# Altium schematic symbol library Tony_.SchLib: 178 symbols (part 3 of 6)
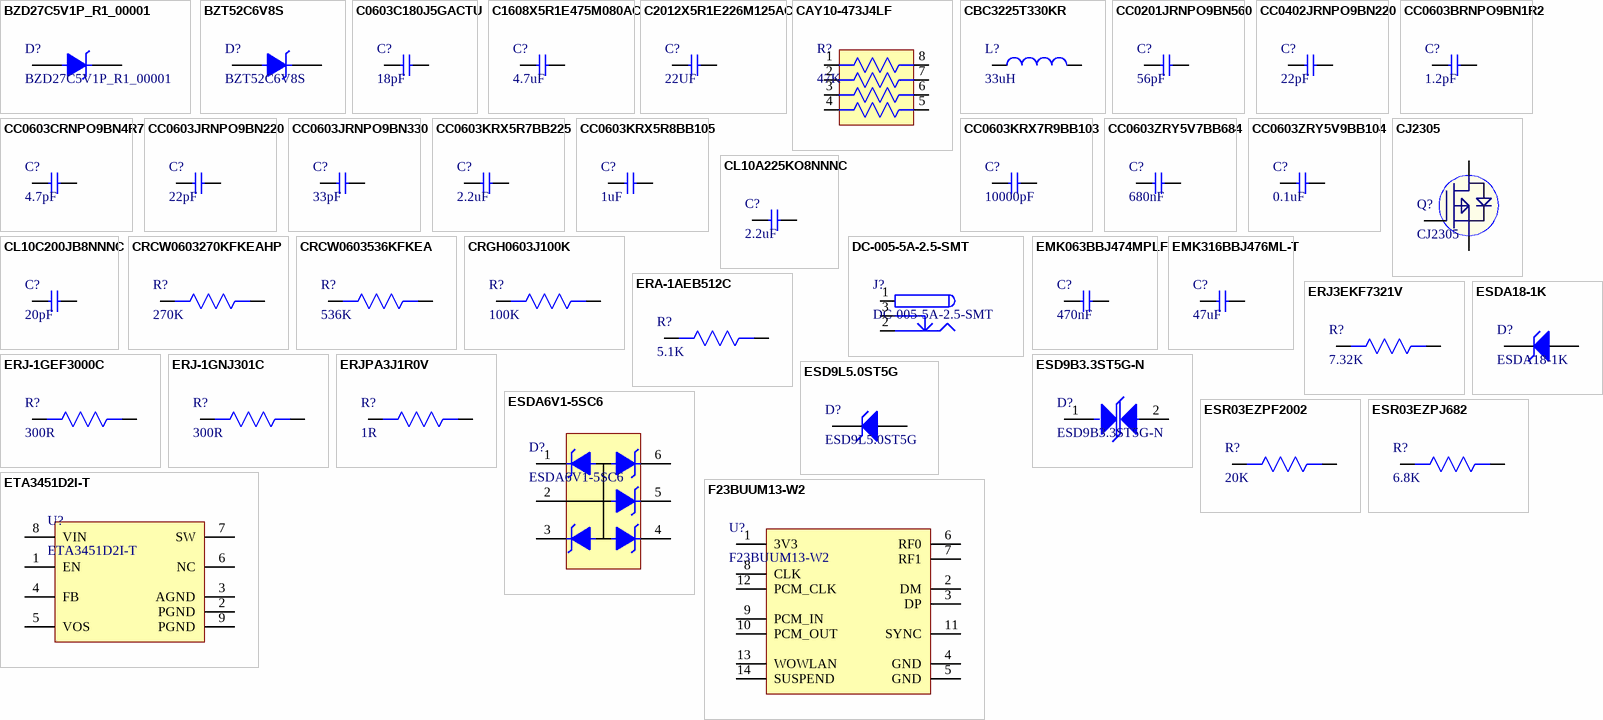
[diagram p6: symbols BZD27C5V1P_R1_00001 to F23BUUM13-W2]

## CC0603JRNPO9BN330
designator C?, comment 33pF
CAP CER 33PF 50V C0G/NPO 0603; Manufacturer: Yageo; Manufacturer Part Number: CC0603JRNPO9BN330; Dielectric Material: Ceramic; Tolerance: 5%; Dielectric: C0G; Temperature Coefficient: 30ppm/°C; Insulation Resistance: 100GR; Supplier 1: Digi-Key; Stock 1: 490595; Pricing 1: 1=0.1, 10=0.045, 100=0.0199, 500=0.01424, 1000=0.01119 (USD); Mount: Surface Mount; Case/Package: 0603; Number of Pins: 2; Case Code (Metric): 1608; Case Code (Imperial): 0603; Min Operating Temperature: -55°C; Max Operating Temperature: 125°C; Capacitance: 33pF; Packaging: Tape and Reel; Voltage Rating: 50V; Package Quantity: 1; Voltage Rating (DC): 50V; Termination: SMD/SMT; Composition: Ceramic; Voltage: 50V; Length: 1.6mm; Height: 0.8mm; Width: 0.031inch; Thickness: 0.035inch; Depth: 0.8mm; Radiation Hardening: No; REACH SVHC: No SVHC; Lead Free: Lead Free; ComponentLink1URL: http://www.yageo.com/documents/recent/UPY-GP_NP0_16V-to-50V_16.pdf?src-supplier=Digi-Key; ComponentLink1Description: http://www.yageo.com/documents/recent/UPY-GP_NP0_16V-to-50V_16.pdf?src-supplier=Digi-Key; ComponentLink2URL: http://www.mouser.com/ds/2/447/Yageo_UPY-GP_NP0_16V-to-50V_9-358835.pdf?src-supplier=Mouser; ComponentLink2Description: http://www.mouser.com/ds/2/447/Yageo_UPY-GP_NP0_16V-to-50V_9-358835.pdf?src-supplier=Mouser; ComponentLink3URL: http://www.farnell.com/datasheets/2213336.pdf?src-supplier=Element14; ComponentLink3Description: http://www.farnell.com/datasheets/2213336.pdf?src-supplier=Element14; ComponentLink4URL: http://www.farnell.com/datasheets/1443161.pdf?src-supplier=Element14; ComponentLink4Description: http://www.farnell.com/datasheets/1443161.pdf?src-supplier=Element14; ComponentLink5URL: http://www.yageo.com/documents/recent/UPY-GP_NP0_16V-to-50V_8.pdf?src-supplier=Avnet; ComponentLink5Description: http://www.yageo.com/documents/recent/UPY-GP_NP0_16V-to-50V_8.pdf?src-supplier=Avnet; ComponentLink6URL: https://www.verical.com/server-webapp/html/getDatasheet?partID=403532&src-supplier=Verical; ComponentLink6Description: https://www.verical.com/server-webapp/html/getDatasheet?partID=403532&src-supplier=Verical; Supplier Part Number 1: 311-1064-1-ND
footprint Cap0603
pins: 1, 2

## CC0603KRX5R7BB225
designator C?, comment 2.2uF
CAP CER 2.2UF 16V X5R 0603; Manufacturer: Yageo; Manufacturer Part Number: CC0603KRX5R7BB225; Tolerance: 10%; Supplier 1: Digi-Key; Stock 1: 261060; Pricing 1: 1=0.2, 10=0.137, 100=0.0694, 500=0.0475, 1000=0.04202 (USD); Mount: Surface Mount; Case/Package: 0603; Case Code (Imperial): 0603; Case Code (Metric): 1608; Min Operating Temperature: -55°C; Max Operating Temperature: 85°C; Capacitance: 2.2uF; Dielectric: X5R; Voltage Rating: 16V; Packaging: Tape and Reel; Voltage Rating (DC): 16V; Termination: SMD/SMT; Composition: Ceramic; Length: 1.6mm; Height: 0.8mm; Width: 0.031inch; Thickness: 0.035inch; Depth: 0.8mm; Radiation Hardening: No; REACH SVHC: Unknown; Lead Free: Lead Free; Halogen Free: Halogen Free; ComponentLink1URL: http://www.farnell.com/datasheets/2167237.pdf?src-supplier=Element14; ComponentLink1Description: http://www.farnell.com/datasheets/2167237.pdf?src-supplier=Element14; Supplier Part Number 1: 311-1784-6-ND
footprint Cap0603
pins: 1, 2

## CC0603KRX5R8BB105
designator C?, comment 1uF
CAP CER 1UF 25V X5R 0603; Manufacturer: Yageo; Manufacturer Part Number: CC0603KRX5R8BB105; Tolerance: 10%; Supplier 1: Digi-Key; Stock 1: 459947; Pricing 1: 1=0.1, 10=0.076, 100=0.0337, 500=0.0241, 1000=0.01894 (USD); Mount: Surface Mount; Case/Package: 0603; Number of Pins: 2; Case Code (Metric): 1608; Case Code (Imperial): 0603; Min Operating Temperature: -55°C; Max Operating Temperature: 85°C; Capacitance: 1uF; Dielectric: X5R; Package Quantity: 1; Voltage Rating: 25V; Packaging: Tape and Reel; Termination: SMD/SMT; Voltage Rating (DC): 25V; Length: 1.6mm; Height: 0.8mm; Width: 0.031inch; Thickness: 0.035inch; Depth: 0.8mm; Radiation Hardening: No; REACH SVHC: No SVHC; Lead Free: Lead Free; Halogen Free: Halogen Free; ComponentLink1URL: http://www.yageo.com/documents/recent/UPY-GPHC_X5R_4V-to-50V_25.pdf?src-supplier=Digi-Key; ComponentLink1Description: http://www.yageo.com/documents/recent/UPY-GPHC_X5R_4V-to-50V_25.pdf?src-supplier=Digi-Key; ComponentLink2URL: http://www.yageo.com/documents/recent/UPY-GPHC_X5R_4V-to-50V_12.pdf?src-supplier=Avnet+Europe; ComponentLink2Description: http://www.yageo.com/documents/recent/UPY-GPHC_X5R_4V-to-50V_12.pdf?src-supplier=Avnet+Europe; ComponentLink3URL: http://www.farnell.com/datasheets/1525783.pdf?src-supplier=Element14; ComponentLink3Description: http://www.farnell.com/datasheets/1525783.pdf?src-supplier=Element14; ComponentLink4URL: http://www.yageo.com/documents/recent/UPY-GPHC_X5R_4V-to-50V_12.pdf?src-supplier=Avnet; ComponentLink4Description: http://www.yageo.com/documents/recent/UPY-GPHC_X5R_4V-to-50V_12.pdf?src-supplier=Avnet; Supplier Part Number 1: 311-1445-1-ND
footprint Cap0603
pins: 1, 2

## CC0603KRX7R9BB103
designator C?, comment 10000pF
CAP CER 10000PF 50V X7R 0603; Manufacturer: Yageo; Manufacturer Part Number: CC0603KRX7R9BB103; Material: Ceramic; Tolerance: 10%; Capacitance: 10nF; Insulation Resistance: 100GR; Supplier 1: Digi-Key; Stock 1: 8411467; Pricing 1: 1=0.1, 10=0.038, 100=0.0171, 500=0.01224, 1000=0.00962 (USD); Mount: Surface Mount; Case/Package: 0603; Number of Pins: 2; Case Code (Metric): 1608; Case Code (Imperial): 0603; Min Operating Temperature: -55°C; Max Operating Temperature: 125°C; Dielectric: X7R; Voltage: 50V; Packaging: Tape and Reel; Voltage Rating: 50V; Voltage Rating (DC): 50V; Package Quantity: 1; Termination: SMD/SMT; Composition: Ceramic; Length: 1.6mm; Height: 0.8mm; Width: 0.031inch; Thickness: 0.035inch; Depth: 0.8mm; Radiation Hardening: No; REACH SVHC: No SVHC; Lead Free: Lead Free; Halogen Free: Halogen Free; ComponentLink1URL: http://www.farnell.com/datasheets/1734573.pdf?src-supplier=Element14; ComponentLink1Description: http://www.farnell.com/datasheets/1734573.pdf?src-supplier=Element14; ComponentLink2URL: http://www.yageo.com/documents/recent/UPY-GPHC_X7R_6.3V-to-50V_18.pdf?src-supplier=Digi-Key; ComponentLink2Description: http://www.yageo.com/documents/recent/UPY-GPHC_X7R_6.3V-to-50V_18.pdf?src-supplier=Digi-Key; ComponentLink3URL: http://www.farnell.com/datasheets/2167236.pdf?src-supplier=Mouser; ComponentLink3Description: http://www.farnell.com/datasheets/2167236.pdf?src-supplier=Mouser; ComponentLink4URL: http://www.farnell.com/datasheets/70765.pdf?src-supplier=Element14; ComponentLink4Description: http://www.farnell.com/datasheets/70765.pdf?src-supplier=Element14; ComponentLink5URL: http://www.yageo.com/documents/recent/UPY-GPHC_X7R_6.3V-to-50V_8.pdf?src-supplier=Avnet+Europe; ComponentLink5Description: http://www.yageo.com/documents/recent/UPY-GPHC_X7R_6.3V-to-50V_8.pdf?src-supplier=Avnet+Europe; ComponentLink6URL: http://www.farnell.com/datasheets/1489800.pdf?src-supplier=Element14; ComponentLink6Description: http://www.farnell.com/datasheets/1489800.pdf?src-supplier=Element14; ComponentLink7URL: https://www.verical.com/server-webapp/html/getDatasheet?partID=403582&src-supplier=Verical; ComponentLink7Description: https://www.verical.com/server-webapp/html/getDatasheet?partID=403582&src-supplier=Verical; Supplier Part Number 1: 311-1085-6-ND
footprint Cap0603
pins: 1, 2

## CC0603ZRY5V7BB684
designator C?, comment 680nF
CAP CER 0.68UF 16V Y5V 0603; Manufacturer: Yageo; Manufacturer Part Number: CC0603ZRY5V7BB684; Tolerance: 80%; Supplier 1: Digi-Key; RoHS: Yes; Category: Ceramic Capacitors; Stock 1: 604; Pricing 1: 1=0.12000, 10=0.08200, 50=0.04660, 100=0.03860, 500=0.02704, 1000=0.02239 (USD); Mount: Surface Mount; Case/Package: 0603; Case Code (Metric): 1608; Case Code (Imperial): 0603; Min Operating Temperature: -30°C; Max Operating Temperature: 85°C; Voltage Rating: 16V; Voltage Rating (DC): 16V; Capacitance: 680nF; Packaging: Tape and Reel; Length: 0.063inch; Width: 0.031inch; Thickness: 0.035inch; Lead Free: Lead Free; Halogen Free: Halogen Free; ComponentLink1URL: http://www.mouser.com/ds/2/447/Yageo_UPY-GP_NP0_16V-to-50V_9-358835.pdf?src-supplier=Mouser; ComponentLink1Description: http://www.mouser.com/ds/2/447/Yageo_UPY-GP_NP0_16V-to-50V_9-358835.pdf?src-supplier=Mouser; ComponentLink2URL: http://www.yageo.com/documents/recent/UPY-GPHC_Y5V_6.3V-to-50V_8.pdf?src-supplier=Digi-Key; ComponentLink2Description: http://www.yageo.com/documents/recent/UPY-GPHC_Y5V_6.3V-to-50V_8.pdf?src-supplier=Digi-Key; Supplier Part Number 1: 311-1828-1-ND
footprint Cap0603
pins: 1, 2

## CC0603ZRY5V9BB104
designator C?, comment 0.1uF
CAP CER 0.1UF 50V Y5V 0603; Manufacturer: Yageo; Manufacturer Part Number: CC0603ZRY5V9BB104; Capacitance: 100nF; Tolerance: 80%; Supplier 1: Digi-Key; Stock 1: 15000880; Pricing 1: 1=0.1, 10=0.075, 100=0.0334, 500=0.02386, 1000=0.01874 (USD); Mount: Surface Mount; Case/Package: 0603; Number of Pins: 2; Case Code (Metric): 1608; Case Code (Imperial): 0603; Min Operating Temperature: -30°C; Max Operating Temperature: 85°C; Dielectric: Y5V; Voltage Rating: 50V; Package Quantity: 1; Packaging: Tape and Reel; Voltage Rating (DC): 50V; Termination: SMD/SMT; Composition: Ceramic; Voltage: 50V; Length: 1.6mm; Height: 0.8mm; Width: 0.031inch; Thickness: 0.035inch; Depth: 0.8mm; Radiation Hardening: No; REACH SVHC: No SVHC; Lead Free: Lead Free; Halogen Free: Halogen Free; ComponentLink1URL: http://www.yageo.com/documents/recent/UPY-GPHC_Y5V_6.3V-to-50V_8.pdf?src-supplier=Digi-Key; ComponentLink1Description: http://www.yageo.com/documents/recent/UPY-GPHC_Y5V_6.3V-to-50V_8.pdf?src-supplier=Digi-Key; ComponentLink2URL: http://www.yageo.com/documents/recent/UPY-GPHC_Y5V_6.3V-to-50V_5.pdf?src-supplier=Avnet+Europe; ComponentLink2Description: http://www.yageo.com/documents/recent/UPY-GPHC_Y5V_6.3V-to-50V_5.pdf?src-supplier=Avnet+Europe; ComponentLink3URL: https://www.verical.com/server-webapp/html/getDatasheet?partID=403611&src-supplier=Verical; ComponentLink3Description: https://www.verical.com/server-webapp/html/getDatasheet?partID=403611&src-supplier=Verical; ComponentLink4URL: http://www.mouser.com/ds/2/447/Yageo_UPY-GP_NP0_16V-to-50V_9-358835.pdf?src-supplier=Mouser; ComponentLink4Description: http://www.mouser.com/ds/2/447/Yageo_UPY-GP_NP0_16V-to-50V_9-358835.pdf?src-supplier=Mouser; ComponentLink5URL: http://www.farnell.com/datasheets/1132289.pdf?src-supplier=Element14; ComponentLink5Description: http://www.farnell.com/datasheets/1132289.pdf?src-supplier=Element14; Supplier Part Number 1: 311-1343-1-ND
footprint Cap0603
pins: 1, 2

## CJ2305
designator Q?
P-Channel -12V 4.1A 900mV @ 250uA 45mΩ @ 3.5A,4.5V 350mW SOT-23(SOT-23-3) MOSFET RoHS; Manufacturer: Changjiang Electronics Tech (CJ); Value: Custom; Manufacturer Part No: CJ2305; Package: SOT-23
footprint SOT-23 (TRANS NPN 40V 0.6A SOT23)
pins: 1 G, 2 S, 3 D

## CL10A225KO8NNNC
designator C?, comment 2.2uF
CAP CER 2.2UF 16V X5R 0603; Manufacturer: Samsung; Manufacturer Part Number: CL10A225KO8NNNC; Material: Ceramic; Tolerance: 10%; Supplier 1: Digi-Key; Stock 1: 421786; Pricing 1: 1=0.13, 10=0.092, 100=0.0435, 500=0.03048, 1000=0.02524 (USD); Mount: Surface Mount; Case/Package: 0603; Case Code (Metric): 1608; Case Code (Imperial): 0603; Contact Plating: Tin; Min Operating Temperature: -55°C; Max Operating Temperature: 85°C; Capacitance: 2.2uF; Dielectric: X5R; Packaging: Tape and Reel; Package Quantity: 4000; Voltage Rating: 16V; Voltage: 16V; Voltage Rating (DC): 16V; Length: 1.6mm; Height: 0.8mm; Width: 0.031inch; Thickness: 0.035inch; Depth: 0.8mm; Radiation Hardening: No; Lead Free: Lead Free; ComponentLink1URL: https://www.verical.com/server-webapp/html/getDatasheet?partID=355165&src-supplier=Verical; ComponentLink1Description: https://www.verical.com/server-webapp/html/getDatasheet?partID=355165&src-supplier=Verical; ComponentLink2URL: http://www.samsungsem.com/kr/support/product-search/mlcc/__icsFiles/afieldfile/2016/08/18/S_CL10A225KO8NNNC.pdf?src-supplier=Digi-Key; ComponentLink2Description: http://www.samsungsem.com/kr/support/product-search/mlcc/__icsFiles/afieldfile/2016/08/18/S_CL10A225KO8NNNC.pdf?src-supplier=Digi-Key; ComponentLink3URL: http://www1.futureelectronics.com/doc/SAMSUNG%20PASSIVE/CL05B104KQ5NNNC.pdf?src-supplier=Future+Electronics; ComponentLink3Description: http://www1.futureelectronics.com/doc/SAMSUNG%20PASSIVE/CL05B104KQ5NNNC.pdf?src-supplier=Future+Electronics; ComponentLink4URL: https://produktinfo.conrad.com/datenblaetter/450000-474999/457919-da-01-en-VS_KONDENSATOR_0603.pdf?src-supplier=Conrad; ComponentLink4Description: https://produktinfo.conrad.com/datenblaetter/450000-474999/457919-da-01-en-VS_KONDENSATOR_0603.pdf?src-supplier=Conrad; Supplier Part Number 1: 1276-1040-1-ND
footprint Cap0603
pins: 1, 2

## CL10C200JB8NNNC
designator C?, comment 20pF
CAP CER 20PF 50V C0G/NP0 0603; Manufacturer: Samsung; Manufacturer Part Number: CL10C200JB8NNNC; Tolerance: 5%; Dielectric: C0G; Temperature Coefficient: 300ppm/°C; Supplier 1: Digi-Key; Stock 1: 591193; Pricing 1: 1=0.1, 10=0.048, 100=0.0214, 500=0.0153, 1000=0.01202 (USD); Mount: Surface Mount; Case/Package: 0603; Case Code (Metric): 1608; Case Code (Imperial): 0603; Min Operating Temperature: -55°C; Max Operating Temperature: 125°C; Capacitance: 20pF; Package Quantity: 1; Packaging: Tape and Reel; Voltage Rating: 50V; Voltage: 50V; Length: 1.6mm; Height: 0.8mm; Width: 0.031inch; Thickness: 0.035inch; Depth: 0.8mm; Radiation Hardening: No; ComponentLink1URL: https://www.verical.com/server-webapp/html/getDatasheet?partID=640634&src-supplier=Verical; ComponentLink1Description: https://www.verical.com/server-webapp/html/getDatasheet?partID=640634&src-supplier=Verical; ComponentLink2URL: https://www.distrelec.biz/Web/Downloads/_e/ng/MLCC_CatalogDownload2013_ENG.pdf?mime=application%2Fpdf&src-supplier=Distrelec; ComponentLink2Description: https://www.distrelec.biz/Web/Downloads/_e/ng/MLCC_CatalogDownload2013_ENG.pdf?mime=application%2Fpdf&src-supplier=Distrelec; Supplier Part Number 1: 1276-1187-6-ND
footprint Cap0603
pins: 1, 2

## CRCW0603270KFKEAHP
designator R?, comment 270K
RES SMD 270K OHM 1% 1/4W 0603; Manufacturer: Vishay Dale; Manufacturer Part Number: CRCW0603270KFKEAHP; Resistance: 270kR; Power Rating: 250mW; Temperature Coefficient: 100ppm/°C; Supplier 1: Digi-Key; RoHS: Yes; Category: Chip SMD Resistors; Stock 1: 1711; Pricing 1: 1=0.17000, 10=0.14800, 100=0.05790, 1000=0.02422, 2500=0.02220 (USD); Mount: Surface Mount; Case/Package: 0603; Contact Plating: Tin; Min Operating Temperature: -55°C; Max Operating Temperature: 155°C; Package Quantity: 5000; Tolerance: 1%; Packaging: Tape and Reel; Resistor Type: Thick Film; Number of Terminations: 2; Max Power Dissipation: 250mW; Termination: Wraparound; Features: Automotive AEC-Q200; Series: CRCW-HP; Length: 0.063inch; Width: 0.033inch; Height: 0.022inch; Lead Free: Lead Free; RoHS Compliant: Yes; ComponentLink1URL: https://datasheet.ciiva.com/2576/crcwhpe3-2576986.pdf?src-supplier=Digi-Key; ComponentLink1Description: https://datasheet.ciiva.com/2576/crcwhpe3-2576986.pdf?src-supplier=Digi-Key; Supplier Part Number 1: 541-CRCW0603270KFKEAHPCT-ND
footprint Res0603
pins: 1, 2

## CRCW0603536KFKEA
designator R?, comment 536K
RES SMD 536K OHM 1% 1/10W 0603; Manufacturer: Vishay; Manufacturer Part Number: CRCW0603536KFKEA; Resistance: 536kR; Max Power Dissipation: 100mW; Temperature Coefficient: 100ppm/°C; Voltage Rating: 75V; Supplier 1: Digi-Key; Stock 1: 4255; Pricing 1: 1=0.1, 10=0.036, 100=0.0145, 1000=0.00652, 2500=0.00566 (USD); Case/Package: 0603; Number of Pins: 2; Weight: 7.1E-05oz; Case Code (Metric): 1608; Case Code (Imperial): 0603; Contact Plating: Tin; Size Code: 0603; Min Operating Temperature: -55°C; Max Operating Temperature: 155°C; Packaging: Tape and Reel; Tolerance: 1%; Package Quantity: 10; Resistor Type: Thick Film; Number of Terminations: 2; Features: Automotive AEC-Q200; Series: CRCW; Power Rating: 100mW; Termination: SMD/SMT; Voltage Rating (DC): 75V; Construction: Rectangular; Technology: THICK FILM; Resistance Tolerance: 1%; Length: 1.55mm; Width: 0.033inch; Height: 0.45mm; Depth: 0.85mm; Radiation Hardening: No; Lead Free: Lead Free; RoHS Compliant: Yes; REACH SVHC: Unknown; Military Standard: Not; ComponentLink1URL: http://www.farnell.com/datasheets/1697337.pdf?src-supplier=Element14; ComponentLink1Description: http://www.farnell.com/datasheets/1697337.pdf?src-supplier=Element14; ComponentLink2URL: http://www.farnell.com/datasheets/2111203.pdf?src-supplier=Element14; ComponentLink2Description: http://www.farnell.com/datasheets/2111203.pdf?src-supplier=Element14; ComponentLink3URL: http://www.vishay.com/docs/20035/dcrcwe3.pdf?src-supplier=Digi-Key; ComponentLink3Description: http://www.vishay.com/docs/20035/dcrcwe3.pdf?src-supplier=Digi-Key; ComponentLink4URL: http://www.mouser.com/ds/2/427/dcrcwe3-109170.pdf?src-supplier=Mouser; ComponentLink4Description: http://www.mouser.com/ds/2/427/dcrcwe3-109170.pdf?src-supplier=Mouser; ComponentLink5URL: http://www.vishay.com/docs/20035/dcrcwe3.pdf?src-supplier=Future+Electronics; ComponentLink5Description: http://www.vishay.com/docs/20035/dcrcwe3.pdf?src-supplier=Future+Electronics; Supplier Part Number 1: 541-536KHDKR-ND
footprint Res0603
pins: 1, 2

## CRGH0603J100K
designator R?, comment 100K
RES SMD 100K OHM 5% 1/5W 0603; Manufacturer: TE Connectivity; Manufacturer Part Number: CRGH0603J100K; Resistance: 100kR; Temperature Coefficient: 100ppm/°C; Power Rating: 200mW; Voltage Rating: 50V; Number of Resistors: 1; Supplier 1: Digi-Key; Stock 1: 23277; Pricing 1: 1=0.1, 10=0.049, 100=0.02, 1000=0.00899, 2500=0.0078 (USD); Mount: Surface Mount; Case/Package: 0603; Case Code (Imperial): 0603; Case Code (Metric): 1608; Min Operating Temperature: -55°C; Max Operating Temperature: 125°C; Tolerance: 5%; Packaging: Tape and Reel; Resistor Type: Thick Film,Power resistor; Number of Terminations: 2; Series: CRGH; Termination: Solder; Voltage Rating (DC): 50V; Resistance Tolerance: 5%; Technology: THICK FILM; Length: 1.6mm; Width: 0.8mm; Height: 0.45mm; Depth: 0.8mm; RoHS Compliant: Yes; REACH SVHC: No SVHC; ELV: Compliant; ComponentLink1URL: http://www.farnell.com/datasheets/2007183.pdf?src-supplier=Element14; ComponentLink1Description: http://www.farnell.com/datasheets/2007183.pdf?src-supplier=Element14; Supplier Part Number 1: A126393DKR-ND
footprint Res0603
pins: 1, 2

## DC-005-5A-2.5-SMT
designator J?
DC Power Receptacle Jack 2.5A 2.5mm 6.5mm SMD Power Connectors RoHS; Manufacturer: XKB Enterprise; Value: Custom; Manufacturer Part No: DC-005-5A-2.5-SMT; Package: Custom
footprint DC-005-5A-2.5-SMT
pins: 1 (power), 2 (power), 3 (power)

## EMK063BBJ474MPLF
designator C?, comment 470nF
CAP CER 0.47UF 16V X5R 0201; Manufacturer: Taiyo Yuden; Manufacturer Part Number: EMK063BBJ474MPLF; Supplier 1: Digi-Key; RoHS: Yes; Category: Ceramic Capacitors; Stock 1: 77979; Pricing 1: 1=0.30000, 10=0.20500, 50=0.13680, 100=0.11630, 500=0.08210, 1000=0.07184, 2500=0.06842, 5000=0.06329 (USD); RoHS Compliant: Yes; Supplier Part Number 1: 587-6265-1-ND
footprint CAP 0201
pins: 1, 2

## EMK316BBJ476ML-T
designator C?, comment 47uF
CAP CER 47UF 16V X5R 1206; Manufacturer: Taiyo Yuden; Manufacturer Part Number: EMK316BBJ476ML-T; Tolerance: 20%; Supplier 1: Digi-Key; Stock 1: 25339; Pricing 1: 1=0.81, 10=0.595, 100=0.408, 500=0.32304, 1000=0.27203 (USD); Mount: Surface Mount; Case/Package: 1206; Case Code (Imperial): 1206; Case Code (Metric): 3216; Min Operating Temperature: -55°C; Max Operating Temperature: 85°C; Packaging: Tape and Reel; Capacitance: 47uF; Voltage Rating: 16V; ComponentLink1URL: http://ds.yuden.co.jp/TYCOMPAS/ut/detail.do?productNo=EMK316BBJ476ML-T&fileName=EMK316BBJ476ML-T_SS&mode=specSheetDownload&src-supplier=Digi-Key; ComponentLink1Description: http://ds.yuden.co.jp/TYCOMPAS/ut/detail.do?productNo=EMK316BBJ476ML-T&fileName=EMK316BBJ476ML-T_SS&mode=specSheetDownload&src-supplier=Digi-Key; ComponentLink2URL: http://www.farnell.com/datasheets/2819853.pdf?src-supplier=Element14; ComponentLink2Description: http://www.farnell.com/datasheets/2819853.pdf?src-supplier=Element14; ComponentLink3URL: http://www.farnell.com/datasheets/2819853.pdf?src-supplier=Farnell; ComponentLink3Description: http://www.farnell.com/datasheets/2819853.pdf?src-supplier=Farnell; ComponentLink4URL: http://www.farnell.com/datasheets/2819853.pdf?src-supplier=Newark; ComponentLink4Description: http://www.farnell.com/datasheets/2819853.pdf?src-supplier=Newark; Supplier Part Number 1: 587-5425-1-ND
footprint Cap1206 (SMD 1206)
pins: 1, 2

## ERA-1AEB512C
designator R?, comment 5.1K
RES 5.1K OHM 0.1% 1/20W 0201; Manufacturer: Cliff; Manufacturer Part Number: ERA-1AEB512C; Resistance: 5100R; Supplier 1: Digi-Key; RoHS: No; Category: Resistors; Stock 1: 14930; Pricing 1: 1=0.36000, 10=0.27700, 100=0.11630, 1000=0.06416, 2500=0.06015, 5000=0.05414 (USD); Case/Package: 0201; Supplier Part Number 1: 10-ERA-1AEB512CCT-ND
footprint Res-0201
pins: 1, 2

## ERJ3EKF7321V
designator R?, comment 7.32K
PANASONIC - ERJ3EKF7321V - RES, 7K32, 1%, 0.1W, 0603, THICK FILM; Manufacturer Part Number: ERJ-3EKF7321V; Resistance: 7.32kR; Power Rating: 100mW; Voltage Rating: 75V; Temperature Coefficient: 100ppm/°C; Voltage Rating (DC): 50V; Supplier 1: Digi-Key; Manufacturer: Panasonic; RoHS: Yes; Category: Chip SMD Resistors; Stock 1: 29175; Pricing 1: 1=0.10000, 10=0.03700, 100=0.01490, 1000=0.00670, 2500=0.00582 (USD); Mount: Surface Mount; Case/Package: 0603; Case Code (Imperial): 0603; Case Code (Metric): 1608; Contact Plating: Tin; Min Operating Temperature: -55°C; Max Operating Temperature: 155°C; Tolerance: 1%; Packaging: Tape and Reel; Package Quantity: 1; Resistor Type: Thick Film; Number of Terminations: 2; Termination: SMD/SMT; Max Power Dissipation: 100mW; Features: Automotive AEC-Q200; Series: ERJ; Construction: Rectangular; Resistance Tolerance: 1%; Length: 1.6mm; Width: 0.8mm; Height: 0.022inch; Depth: 0.8mm; REACH SVHC: Yes; Military Standard: Not; Lead Free: Lead Free; RoHS Compliant: Yes; ComponentLink1URL: https://datasheet.ciiva.com/9194/aoa0000ce2-9194774.pdf?src-supplier=Avnet; ComponentLink1Description: https://datasheet.ciiva.com/9194/aoa0000ce2-9194774.pdf?src-supplier=Avnet; ComponentLink2URL: https://datasheet.ciiva.com/46444/1678782-46444026.pdf?src-supplier=Element14; ComponentLink2Description: https://datasheet.ciiva.com/46444/1678782-46444026.pdf?src-supplier=Element14; ComponentLink3URL: https://datasheet.ciiva.com/16762/70260748-16762539.pdf?src-supplier=Allied+Electronics; ComponentLink3Description: https://datasheet.ciiva.com/16762/70260748-16762539.pdf?src-supplier=Allied+Electronics; ComponentLink4URL: https://datasheet.ciiva.com/7829/1678782-7829324.pdf?src-supplier=Element14; ComponentLink4Description: https://datasheet.ciiva.com/7829/1678782-7829324.pdf?src-supplier=Element14; ComponentLink5URL: https://datasheet.ciiva.com/22681/1678782-22681324.pdf?src-supplier=Element14; ComponentLink5Description: https://datasheet.ciiva.com/22681/1678782-22681324.pdf?src-supplier=Element14; ComponentLink6URL: https://datasheet.ciiva.com/30232/aoa0000ce2-30232076.pdf?src-supplier=Onlinecomponents.com; ComponentLink6Description: https://datasheet.ciiva.com/30232/aoa0000ce2-30232076.pdf?src-supplier=Onlinecomponents.com; ComponentLink7URL: https://datasheet.ciiva.com/16778/70260748-16778589.pdf?src-supplier=Allied+Electronics; ComponentLink7Description: https://datasheet.ciiva.com/16778/70260748-16778589.pdf?src-supplier=Allied+Electronics; Supplier Part Number 1: P7.32KHCT-ND
footprint Res0603
pins: 1, 2

## ERJ-1GEF3000C
designator R?, comment 300R
RES SMD 300 OHM 1% 1/20W 0201; ComponentLink1URL: http://www.yageo.com/NewPortal/yageodocoutput?fileName=/pdf/R-Chip/PYu-AC_51_RoHS_L_6.pdf&src-supplier=Digi-Key; ComponentLink1Description: http://www.yageo.com/NewPortal/yageodocoutput?fileName=/pdf/R-Chip/PYu-AC_51_RoHS_L_6.pdf&src-supplier=Digi-Key
footprint Res-0201
pins: 1, 2

## ERJ-1GNJ301C
designator R?, comment 300R
RES SMD 300 OHM 5% 1/20W 0201; Manufacturer: Panasonic; Manufacturer Part Number: ERJ-1GNJ301C; Max Power Dissipation: 50mW; Temperature Coefficient: 200ppm/°C; Voltage Rating: 25V; Supplier 1: Digi-Key; RoHS: Yes; Category: Chip SMD Resistors; Stock 1: 65293; Pricing 1: 1=0.10000, 10=0.02800, 100=0.01150, 1000=0.00518, 2500=0.00450, 5000=0.00371 (USD); Mount: Surface Mount; Case/Package: 0201; Case Code (Metric): 0603; Case Code (Imperial): 0201; Contact Plating: Tin; Weight: 6E-06oz; Min Operating Temperature: -55°C; Max Operating Temperature: 125°C; Resistor Type: Thick Film; Number of Terminations: 2; Termination: SMD/SMT; Resistance: 300R; Packaging: Tape and Reel; Power Rating: 50mW; Tolerance: 5%; Package Quantity: 15000; Length: 0.024inch; Width: 0.012inch; Height: 0.01inch; ComponentLink1URL: http://www.mouser.com/ds/2/315/AOA0000C84-947596.pdf?src-supplier=Mouser; ComponentLink1Description: http://www.mouser.com/ds/2/315/AOA0000C84-947596.pdf?src-supplier=Mouser; ComponentLink2URL: http://www.onlinecomponents.com/datasheet/erj-1gnj301c.aspx?p=44467777&src-supplier=Onlinecomponents.com; ComponentLink2Description: http://www.onlinecomponents.com/datasheet/erj-1gnj301c.aspx?p=44467777&src-supplier=Onlinecomponents.com; ComponentLink3URL: https://industrial.panasonic.com/cdbs/www-data/pdf/RDM0000/DMM0000COL11.pdf?src-supplier=Digi-Key; ComponentLink3Description: https://industrial.panasonic.com/cdbs/www-data/pdf/RDM0000/DMM0000COL11.pdf?src-supplier=Digi-Key; ComponentLink4URL: https://b2b-api.panasonic.eu/file_stream/pids/fileversion/1242?src-supplier=Digi-Key; ComponentLink4Description: https://b2b-api.panasonic.eu/file_stream/pids/fileversion/1242?src-supplier=Digi-Key; ComponentLink5URL: http://industrial.panasonic.com/www-cgi/jvcr13pz.cgi?E+PZ+3+AOA0002+ERJ1GNJ301C+7+WW?src-supplier=Digi-Key; ComponentLink5Description: http://industrial.panasonic.com/www-cgi/jvcr13pz.cgi?E+PZ+3+AOA0002+ERJ1GNJ301C+7+WW?src-supplier=Digi-Key; Supplier Part Number 1: P123298CT-ND
footprint Res-0201
pins: 1, 2

## ERJPA3J1R0V
designator R?, comment 1R
RES SMD 1 OHM 5% 1/4W 0603; Manufacturer: Panasonic; Manufacturer Part Number: ERJ-PA3J1R0V; Max Power Dissipation: 250mW; Temperature Coefficient: 200ppm/°C; Supplier 1: Digi-Key; RoHS: Yes; Category: Chip SMD Resistors; Stock 1: 42791; Pricing 1: 1=0.10000, 10=0.09000, 100=0.03450, 1000=0.01518, 2500=0.01311 (USD); Case/Package: 0603; Case Code (Metric): 1608; Case Code (Imperial): 0603; Contact Plating: Tin; Min Operating Temperature: -55°C; Max Operating Temperature: 155°C; Resistance: 1R; Packaging: Tape and Reel; Resistor Type: Thick Film; Number of Terminations: 2; Tolerance: 5%; Features: Automotive AEC-Q200; Length: 0.063inch; Width: 0.031inch; Height: 0.018inch; ComponentLink1URL: https://industrial.panasonic.com/ww/system/files/data/download/catalog/id_fixed-resistors_e_1.pdf?src-supplier=Digi-Key; ComponentLink1Description: https://industrial.panasonic.com/ww/system/files/data/download/catalog/id_fixed-resistors_e_1.pdf?src-supplier=Digi-Key; ComponentLink2URL: https://industrial.panasonic.com/cdbs/www-data/pdf/RDO0000/AOA0000C331.pdf?src-supplier=Digi-Key; ComponentLink2Description: https://industrial.panasonic.com/cdbs/www-data/pdf/RDO0000/AOA0000C331.pdf?src-supplier=Digi-Key; Supplier Part Number 1: P1.00BZCT-ND
footprint Res0603
pins: 1, 2

## ESD9B3.3ST5G-N
designator D?
Bidirectional 3.3V (Max) 3.8V 8V 10A (8/20us) SMD TVS RoHS; Manufacturer: Bourne Semicon (Shenzhen); ComponentLink1URL: https://www.mouser.com/ds/2/302/PESD3V3X1BL-64229.pdf?src-supplier=Mouser; ComponentLink1Description: https://www.mouser.com/ds/2/302/PESD3V3X1BL-64229.pdf?src-supplier=Mouser; ComponentLink2URL: https://assets.nexperia.com/documents/data-sheet/PESD3V3X1BL.pdf?src-supplier=Digi-Key; ComponentLink2Description: https://assets.nexperia.com/documents/data-sheet/PESD3V3X1BL.pdf?src-supplier=Digi-Key; ComponentLink3URL: http://www.onsemi.cn/pub_link/Collateral/ESD9B-D.PDF?src-supplier=Digi-Key; ComponentLink3Description: http://www.onsemi.cn/pub_link/Collateral/ESD9B-D.PDF?src-supplier=Digi-Key; ComponentLink4URL: http://www.onsemi.com/pub/Collateral/ESD9B-D.PDF?src-supplier=Avnet+Europe; ComponentLink4Description: http://www.onsemi.com/pub/Collateral/ESD9B-D.PDF?src-supplier=Avnet+Europe; ComponentLink5URL: http://www.mouser.com/ds/2/308/ESD9B-D-479788.pdf?src-supplier=Mouser; ComponentLink5Description: http://www.mouser.com/ds/2/308/ESD9B-D-479788.pdf?src-supplier=Mouser; ComponentLink6URL: http://www.farnell.com/datasheets/1596367.pdf?src-supplier=Element14; ComponentLink6Description: http://www.farnell.com/datasheets/1596367.pdf?src-supplier=Element14; ComponentLink7URL: https://www.verical.com/server-webapp/html/getDatasheet?partID=292713&src-supplier=Verical; ComponentLink7Description: https://www.verical.com/server-webapp/html/getDatasheet?partID=292713&src-supplier=Verical; ComponentLink8URL: http://www.onsemi.com/pub/Collateral/ESD9B-D.PDF?src-supplier=Avnet; ComponentLink8Description: http://www.onsemi.com/pub/Collateral/ESD9B-D.PDF?src-supplier=Avnet; Manufacturer Part No: ESD9B3.3ST5G-N; Package: DFN1006; Value: 3.3V
footprint ESD9B3.3ST5G-N (TVS DIODE Bidirectional 3.3V (Max) 3.8V 8V 10A SOD923)
pins: 1, 2

## ESD9L5.0ST5G
designator D?
TVS DIODE 5V 9.8V SOD923; Manufacturer: ON Semiconductor; Capacitance: 0.9pF; Direction: Unidirectional; Number of Unidirectional Channels: 1; Min Breakdown Voltage: 5.4V; Power Line Protection: No; Leakage Current: 1uA; Element Configuration: Single; Peak Pulse Current: 1A; Diode Type: ZENER; Reverse Breakdown Voltage: 5.8V; Peak Pulse Power: 150mW; ESD Protection: Yes; Test Current: 1mA; Supplier 1: Digi-Key; Manufacturer Part Number: ESD9L5.0ST5G; RoHS: Yes; Category: ESD and Circuit Protection ICs; Stock 1: 558996; Pricing 1: 1=0.37000, 10=0.25600, 100=0.12500, 500=0.10426, 1000=0.07244, 2000=0.06278 (USD); Case/Package: SOD-923-2; Number of Pins: 2; Contact Plating: Tin,Matte; Min Operating Temperature: -55°C; Max Operating Temperature: 150°C; Package Quantity: 1; Packaging: Tape and Reel; Clamping Voltage: 9.8V; Reverse Standoff Voltage: 5V; Working Voltage: 5V; Resistor Type: Zener; Series: Automotive, AEC-Q101; Number of Elements: 1; Operating Supply Voltage: 5V; Max Surge Current: 1A; Breakdown Voltage: 5.4V; Number of Channels: 1; Polarity: Unidirectional; Termination: SMD/SMT; Max Reverse Leakage Current: 1uA; Max Breakdown Voltage: 5.4V; Number of Lines: 1; Power Dissipation: 150mW; Clamping Voltage-Max: 9.8V; Length: 0.8mm; Width: 0.65mm; Height: 0.4mm; Depth: 0.6mm; Radiation Hardening: No; Lead Free: Lead Free; RoHS Compliant: Yes; REACH SVHC: No SVHC; Halogen Free: Halogen Free; ComponentLink1URL: https://datasheet.ciiva.com/15143/getdatasheetpartid-185186-15143896.pdf?src-supplier=Verical; ComponentLink1Description: https://datasheet.ciiva.com/15143/getdatasheetpartid-185186-15143896.pdf?src-supplier=Verical; ComponentLink2URL: https://datasheet.ciiva.com/4510/esd9l-d-4510647.pdf?src-supplier=Mouser; ComponentLink2Description: https://datasheet.ciiva.com/4510/esd9l-d-4510647.pdf?src-supplier=Mouser; ComponentLink3URL: https://datasheet.ciiva.com/3304/esd9l-d-3304011.pdf?src-supplier=Avnet; ComponentLink3Description: https://datasheet.ciiva.com/3304/esd9l-d-3304011.pdf?src-supplier=Avnet; ComponentLink4URL: https://datasheet.ciiva.com/16437/esd9l-d-16437835.pdf?src-supplier=Future+Electronics; ComponentLink4Description: https://datasheet.ciiva.com/16437/esd9l-d-16437835.pdf?src-supplier=Future+Electronics; ComponentLink5URL: https://datasheet.ciiva.com/339/esd9l-d-339853.pdf?src-supplier=Digi-Key; ComponentLink5Description: https://datasheet.ciiva.com/339/esd9l-d-339853.pdf?src-supplier=Digi-Key; ComponentLink6URL: https://datasheet.ciiva.com/339/esd9l-d-339854.pdf?src-supplier=Digi-Key; ComponentLink6Description: https://datasheet.ciiva.com/339/esd9l-d-339854.pdf?src-supplier=Digi-Key; ComponentLink7URL: https://datasheet.ciiva.com/11195/esd9l-d-11195342.pdf?src-supplier=Avnet; ComponentLink7Description: https://datasheet.ciiva.com/11195/esd9l-d-11195342.pdf?src-supplier=Avnet; ComponentLink8URL: https://datasheet.ciiva.com/25958/esd9l-d-25958446.pdf?src-supplier=Avnet+Europe; ComponentLink8Description: https://datasheet.ciiva.com/25958/esd9l-d-25958446.pdf?src-supplier=Avnet+Europe; ComponentLink9URL: https://datasheet.ciiva.com/339/esd9l-d-339855.pdf?src-supplier=Digi-Key; ComponentLink9Description: https://datasheet.ciiva.com/339/esd9l-d-339855.pdf?src-supplier=Digi-Key; Supplier Part Number 1: ESD9L5.0ST5GOSCT-ND
footprint SOD-923
pins: 1 K, 2 A

## ESDA6V1-5SC6
designator D?
TVS DIODE 3V SOT23-6; Manufacturer: STMicroelectronics; Direction: Unidirectional; Min Breakdown Voltage: 6.1V; Clamping Voltage: 11.35V; Peak Pulse Current: 15A; Number of Elements: 5; Capacitance: 50pF; Element Configuration: Common Anode; Peak Pulse Power: 100W; Power Line Protection: No; Max Reverse Leakage Current: 1uA; Test Current: 1mA; Max Breakdown Voltage: 7.2V; ESD Protection: Yes; Diode Type: ZENER; Supplier 1: Digi-Key; Manufacturer Part Number: ESDA6V1-5SC6; RoHS: Yes; Category: TVS Diodes; Stock 1: 10768; Pricing 1: 1=0.46000, 10=0.39400, 100=0.27370, 500=0.21368, 1000=0.17378 (USD); Mount: Surface Mount; Case/Package: SOT-23; Number of Pins: 6; Min Operating Temperature: -40°C; Max Operating Temperature: 125°C; Packaging: Tape and Reel; Reverse Standoff Voltage: 3V; Package Quantity: 1; Number of Channels: 5; Operating Supply Voltage: 3V; Number of Unidirectional Channels: 5; Polarity: Unidirectional; Breakdown Voltage: 6.1V; Termination: SMD/SMT; Working Voltage: 3V; Resistor Type: Zener; Series: ESDA, TRANSIL™; Reverse Breakdown Voltage: 6.1V; Max Power Dissipation: 100W; Leakage Current: 1uA; Voltage Rating (DC): 6.1V; Length: 3.05mm; Width: 1.75mm; Height: 1.3mm; Depth: 1.75mm; Radiation Hardening: No; RoHS Compliant: Yes; REACH SVHC: No SVHC; Lead Free: Lead Free; ComponentLink1URL: https://datasheet.ciiva.com/5782/453742-5782854.pdf?src-supplier=Farnell; ComponentLink1Description: https://datasheet.ciiva.com/5782/453742-5782854.pdf?src-supplier=Farnell; ComponentLink2URL: https://datasheet.ciiva.com/15143/getdatasheetpartid-146092-15143750.pdf?src-supplier=Verical; ComponentLink2Description: https://datasheet.ciiva.com/15143/getdatasheetpartid-146092-15143750.pdf?src-supplier=Verical; ComponentLink3URL: https://datasheet.ciiva.com/16210/cd00005102-16210854.pdf?src-supplier=Future+Electronics; ComponentLink3Description: https://datasheet.ciiva.com/16210/cd00005102-16210854.pdf?src-supplier=Future+Electronics; ComponentLink4URL: https://datasheet.ciiva.com/14161/esda6v1l-st-eng-tds-14161530.pdf?src-supplier=Distrelec; ComponentLink4Description: https://datasheet.ciiva.com/14161/esda6v1l-st-eng-tds-14161530.pdf?src-supplier=Distrelec; ComponentLink5URL: https://datasheet.ciiva.com/4507/cd00005102-58005-4507934.pdf?src-supplier=Mouser; ComponentLink5Description: https://datasheet.ciiva.com/4507/cd00005102-58005-4507934.pdf?src-supplier=Mouser; ComponentLink6URL: https://datasheet.ciiva.com/338/cd00005102-338720.pdf?src-supplier=Digi-Key; ComponentLink6Description: https://datasheet.ciiva.com/338/cd00005102-338720.pdf?src-supplier=Digi-Key; ComponentLink7URL: https://datasheet.ciiva.com/22695/453742-22695670.pdf?src-supplier=Element14; ComponentLink7Description: https://datasheet.ciiva.com/22695/453742-22695670.pdf?src-supplier=Element14; ComponentLink8URL: https://datasheet.ciiva.com/7662/453742-7662123.pdf?src-supplier=Element14; ComponentLink8Description: https://datasheet.ciiva.com/7662/453742-7662123.pdf?src-supplier=Element14; ComponentLink9URL: https://datasheet.ciiva.com/1276/453742-1276863.pdf?src-supplier=Element14; ComponentLink9Description: https://datasheet.ciiva.com/1276/453742-1276863.pdf?src-supplier=Element14; ComponentLink10URL: https://datasheet.ciiva.com/41443/001184254-da-01-en-transil-array-esda6v1-5sc6-sot-23-6-stm-41443467.pdf?src-supplier=Conrad; ComponentLink10Description: https://datasheet.ciiva.com/41443/001184254-da-01-en-transil-array-esda6v1-5sc6-sot-23-6-stm-41443467.pdf?src-supplier=Conrad; Supplier Part Number 1: 497-7747-1-ND
footprint SOT-23-6 (IC BAT CHG LI-ION 1 CELL SOT23-6)
pins: 1 I/O1, 2 GND, 3 I/O2, 4 I/O3, 5 I/O4, 6 I/O5

## ESDA18-1K
designator D?
TVS DIODE 15V 34V SOD523; Manufacturer: STMicroelectronics; Direction: Unidirectional; Number of Unidirectional Channels: 1; Min Breakdown Voltage: 18V; Peak Pulse Power: 400W; Power Line Protection: No; Max Power Dissipation: 450W; Peak Pulse Current: 12A; Diode Type: ZENER; Capacitance: 105pF; Leakage Current: 500nA; Element Configuration: Single; ESD Protection: Yes; Clamping Voltage-Max: 24V; Supplier 1: Digi-Key; Manufacturer Part Number: ESDA18-1K; RoHS: Yes; Category: TVS Diodes; Stock 1: 43962; Pricing 1: 1=0.41000, 10=0.28900, 100=0.14570, 500=0.12912, 1000=0.10049 (USD); Mount: Surface Mount; Number of Pins: 2; Contact Plating: Tin,Matte; Min Operating Temperature: -40°C; Max Operating Temperature: 150°C; Clamping Voltage: 34V; Packaging: Tape and Reel; Package Quantity: 1; Reverse Standoff Voltage: 15V; Polarity: Unidirectional; Breakdown Voltage: 18V; Working Voltage: 15V; Resistor Type: Zener; Series: ESDA, TRANSIL™; Number of Channels: 1; Termination: SMD/SMT; Max Reverse Leakage Current: 500nA; Max Breakdown Voltage: 18V; Length: 1.2mm; Width: 0.9mm; Height: 0.5mm; Depth: 0.8mm; Radiation Hardening: No; RoHS Compliant: Yes; REACH SVHC: No SVHC; Lead Free: Lead Free; ComponentLink1URL: https://datasheet.ciiva.com/25958/cd00283838-25958148.pdf?src-supplier=Avnet+Europe; ComponentLink1Description: https://datasheet.ciiva.com/25958/cd00283838-25958148.pdf?src-supplier=Avnet+Europe; ComponentLink2URL: https://datasheet.ciiva.com/1276/1303462-1276854.pdf?src-supplier=Element14; ComponentLink2Description: https://datasheet.ciiva.com/1276/1303462-1276854.pdf?src-supplier=Element14; ComponentLink3URL: https://datasheet.ciiva.com/4479/cd00283838-118092-4479548.pdf?src-supplier=Mouser; ComponentLink3Description: https://datasheet.ciiva.com/4479/cd00283838-118092-4479548.pdf?src-supplier=Mouser; ComponentLink4URL: https://datasheet.ciiva.com/5782/cd00283838-5782837.pdf?src-supplier=Farnell; ComponentLink4Description: https://datasheet.ciiva.com/5782/cd00283838-5782837.pdf?src-supplier=Farnell; ComponentLink5URL: https://datasheet.ciiva.com/337/cd00283838-337816.pdf?src-supplier=Digi-Key; ComponentLink5Description: https://datasheet.ciiva.com/337/cd00283838-337816.pdf?src-supplier=Digi-Key; ComponentLink6URL: https://datasheet.ciiva.com/16437/cd00283838-16437848.pdf?src-supplier=Future+Electronics; ComponentLink6Description: https://datasheet.ciiva.com/16437/cd00283838-16437848.pdf?src-supplier=Future+Electronics; ComponentLink7URL: https://datasheet.ciiva.com/337/cd00283838-337817.pdf?src-supplier=Digi-Key; ComponentLink7Description: https://datasheet.ciiva.com/337/cd00283838-337817.pdf?src-supplier=Digi-Key; ComponentLink8URL: https://datasheet.ciiva.com/337/cd00283838-337818.pdf?src-supplier=Digi-Key; ComponentLink8Description: https://datasheet.ciiva.com/337/cd00283838-337818.pdf?src-supplier=Digi-Key; ComponentLink9URL: https://datasheet.ciiva.com/11195/cd00283838-11195357.pdf?src-supplier=Avnet; ComponentLink9Description: https://datasheet.ciiva.com/11195/cd00283838-11195357.pdf?src-supplier=Avnet; ComponentLink10URL: https://datasheet.ciiva.com/15193/getdatasheetpartid-249500-15193085.pdf?src-supplier=Verical; ComponentLink10Description: https://datasheet.ciiva.com/15193/getdatasheetpartid-249500-15193085.pdf?src-supplier=Verical; Supplier Part Number 1: 497-10767-1-ND
footprint SOD-523
pins: 1 K, 2 A

## ESR03EZPF2002
designator R?, comment 20K
RES SMD 20K OHM 1% 1/4W 0603; Manufacturer: Rohm; Manufacturer Part Number: ESR03EZPF2002; Resistance: 20kR; Max Power Dissipation: 250mW; Temperature Coefficient: 100ppm/°C; Supplier 1: Digi-Key; Stock 1: 4737; Pricing 1: 1=0.13, 10=0.12, 100=0.046, 1000=0.02024, 2500=0.01748 (USD); Case/Package: 0603; Case Code (Metric): 1608; Case Code (Imperial): 0603; Min Operating Temperature: -55°C; Max Operating Temperature: 155°C; Package Quantity: 1; Tolerance: 1%; Packaging: Tape and Reel; Resistor Type: Thick Film; Number of Terminations: 2; Features: Automotive AEC-Q200; Series: ESR; Length: 0.063inch; Width: 0.031inch; Height: 0.022inch; RoHS Compliant: Yes; ComponentLink1URL: https://www.rohm.com/datasheet/ESR01MZPF/esr-e?src-supplier=Digi-Key; ComponentLink1Description: https://www.rohm.com/datasheet/ESR01MZPF/esr-e?src-supplier=Digi-Key; Supplier Part Number 1: RHM20.0KADCT-ND
footprint Res0603
pins: 1, 2

## ESR03EZPJ682
designator R?, comment 6.8K
RES SMD 6.8K OHM 5% 1/4W 0603; Manufacturer: Rohm; Manufacturer Part Number: ESR03EZPJ682; Resistance: 6.8kR; Max Power Dissipation: 250mW; Temperature Coefficient: 200ppm/°C; Supplier 1: Digi-Key; RoHS: Yes; Category: Chip SMD Resistors; Stock 1: 4769; Pricing 1: 1=0.10000, 10=0.08200, 100=0.03160, 1000=0.01392, 2500=0.01202 (USD); Case/Package: 0603; Case Code (Metric): 1608; Case Code (Imperial): 0603; Min Operating Temperature: -55°C; Max Operating Temperature: 155°C; Package Quantity: 5000; Packaging: Cut Tape; Tolerance: 5%; Resistor Type: Thick Film; Number of Terminations: 2; Features: Automotive AEC-Q200; Series: ESR; Length: 0.063inch; Width: 0.031inch; Height: 0.022inch; Lead Free: Lead Free; RoHS Compliant: Yes; ComponentLink1URL: https://datasheet.ciiva.com/14928/esr-14928716.pdf?src-supplier=Digi-Key; ComponentLink1Description: https://datasheet.ciiva.com/14928/esr-14928716.pdf?src-supplier=Digi-Key; ComponentLink2URL: https://datasheet.ciiva.com/14930/esr-14930536.pdf?src-supplier=Digi-Key; ComponentLink2Description: https://datasheet.ciiva.com/14930/esr-14930536.pdf?src-supplier=Digi-Key; ComponentLink3URL: https://datasheet.ciiva.com/14932/esr-14932333.pdf?src-supplier=Digi-Key; ComponentLink3Description: https://datasheet.ciiva.com/14932/esr-14932333.pdf?src-supplier=Digi-Key; Supplier Part Number 1: RHM6.8KDCT-ND
footprint Res0603
pins: 1, 2

## ETA3451D2I-T
designator U?
Manufacturer: ZUCZUG; Value: Custom; Manufacturer Part No: ETA3451D2I-T; Package: QFN-8
footprint QFN-8
pins: 1 EN, 2 PGND, 3 AGND, 4 FB, 5 VOS, 6 NC, 7 SW, 8 VIN, 9 PGND

## F23BUUM13-W2
designator U?
Realtek RTL8723BU Combo Module
footprint F23BUUM13-W2 (Wifi+BLE module)
pins: 1 3V3, 2 DM, 3 DP, 4 GND, 5 GND, 6 RF0, 7 RF1, 8 CLK, 9 PCM_IN, 10 PCM_OUT, 11 SYNC, 12 PCM_CLK, 13 WOWLAN, 14 SUSPEND

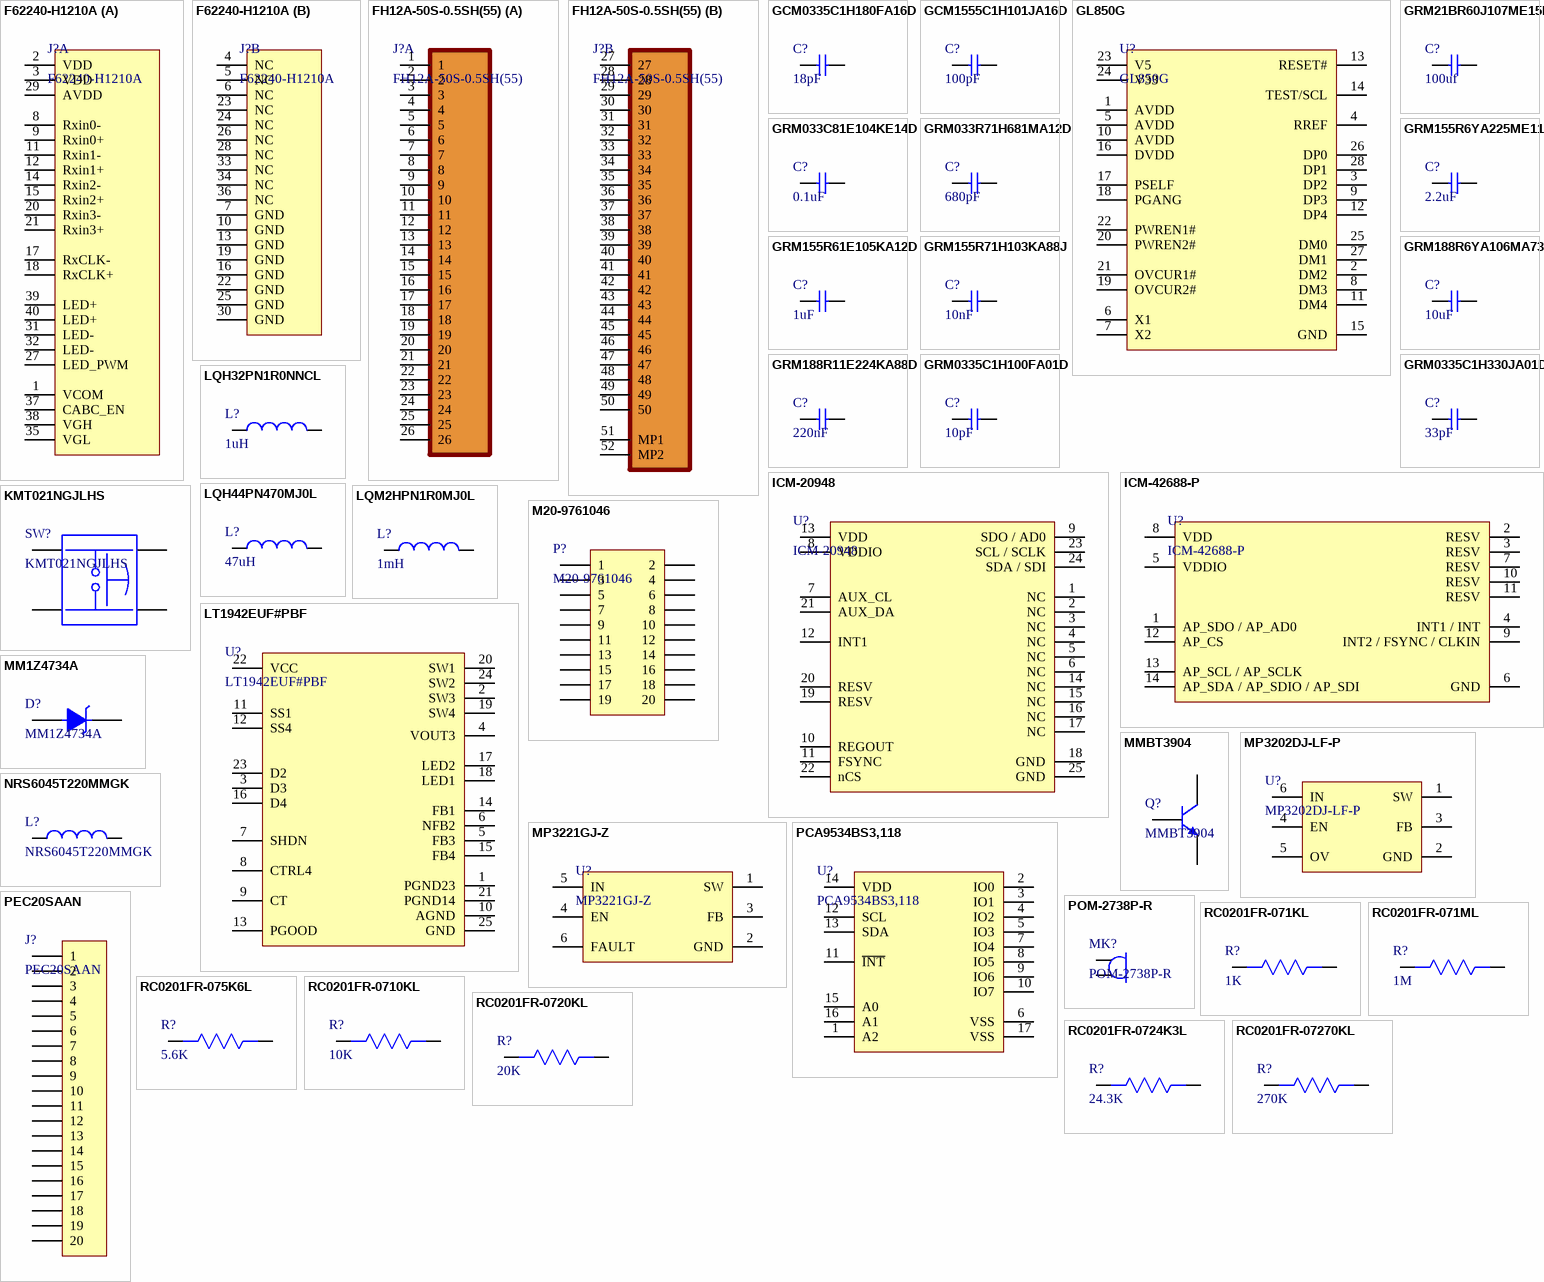
[diagram p2: symbols F62240-H1210A to RC0201FR-07270KL]

## F62240-H1210A
designator J?
A 40Pin Connector; Manufacturer: Microchip Technology; Value: Custom; Manufacturer Part No: F62240-H1210A; Package: Custom
part A pins: 1 VCOM, 2 VDD, 3 VDD, 8 Rxin0-, 9 Rxin0+, 11 Rxin1-, 12 Rxin1+ , 14 Rxin2- , 15 Rxin2+, 17 RxCLK- , 18 RxCLK+, 20 Rxin3- , 21 Rxin3+, 27 LED_PWM, 29 AVDD, 31 LED- , 32 LED- , 35 VGL, 37 CABC_EN, 38 VGH, 39 LED+ , 40 LED+ 
part B pins: 4 NC, 5 NC, 6 NC, 7 GND, 10 GND, 13 GND, 16 GND, 19 GND, 22 GND, 23 NC, 24 NC, 25 GND, 26 NC, 28 NC, 30 GND, 33 NC, 34 NC, 36 NC

## FH12A-50S-0.5SH(55)
designator J?
Conn FFC/FPC 50 POS 0.5mm  SMD T/R; Manufacturer: Hirose; Actuator Material: Polyphenylene; Number of Contacts: 50; Wire/Cable Type: Straight; Gender: Female; Current Rating: 500mA; Voltage Rating: 50V; Contact Resistance: 50mR; Max Current Rating: 400mA; Contact Location: Top; Insulation Resistance: 500MR; Mating Cycles: 20; Supplier 1: Digi-Key; Manufacturer Part Number: FH12A-50S-0.5SH(55); RoHS: Yes; Category: FFC / FPC; Pricing 1: 1=3.00000, 10=2.88000, 25=2.64000, 50=2.52000, 100=2.40000, 250=2.10000, 500=2.04000, 1000=1.74000 (USD); Mount: Surface Mount; Housing Material: Polyamide; Contact Material: Bronze; Contact Plating: Gold; Housing Color: Beige; Material: Polyamide; Color: Beige,Brown; Min Operating Temperature: -40°C; Max Operating Temperature: 70°C; Orientation: Right Angle; Termination: Solder; Number of Rows: 1; Package Quantity: 2000; Packaging: Tape and Reel; Number of Positions: 50; Max Voltage Rating (AC): 50V; Voltage Rating (AC): 50V; Length: 29.5mm; Width: 29.1mm; Pitch: 0.5mm; Depth: 6.2mm; Lead Pitch: 0.5mm; Radiation Hardening: No; Flammability Rating: UL94 V-0; Lead Free: Lead Free; REACH SVHC: No SVHC; ComponentLink1URL: https://datasheet.ciiva.com/14667/0900766b80806912-14667338.pdf?src-supplier=RSComponents; ComponentLink1Description: https://datasheet.ciiva.com/14667/0900766b80806912-14667338.pdf?src-supplier=RSComponents; ComponentLink2URL: https://datasheet.ciiva.com/11745/0900766b80d985fc-11745058.pdf?src-supplier=RSComponents; ComponentLink2Description: https://datasheet.ciiva.com/11745/0900766b80d985fc-11745058.pdf?src-supplier=RSComponents; ComponentLink3URL: https://datasheet.ciiva.com/15176/getdatasheetpartid-447852-15176863.pdf?src-supplier=Verical; ComponentLink3Description: https://datasheet.ciiva.com/15176/getdatasheetpartid-447852-15176863.pdf?src-supplier=Verical; ComponentLink4URL: https://datasheet.ciiva.com/7989/58809-7989413.pdf?src-supplier=Element14; ComponentLink4Description: https://datasheet.ciiva.com/7989/58809-7989413.pdf?src-supplier=Element14; ComponentLink5URL: https://datasheet.ciiva.com/5137/ed-fh12-20140305-355586-5137621.pdf?src-supplier=Mouser; ComponentLink5Description: https://datasheet.ciiva.com/5137/ed-fh12-20140305-355586-5137621.pdf?src-supplier=Mouser; Supplier Part Number 1: HFK150CT-ND
footprint FH12A-50S-0.5SH(55) (50 0.020"(0.50mm) 0.079"(2.00mm) Forward Slip Contact,Top SMD FFC, FPC Connectors ROHS)
part A pins: 1, 2, 3, 4, 5, 6, 7, 8, 9, 10, 11, 12, 13, 14, 15, 16, 17, 18, 19, 20, 21, 22, 23, 24, 25, 26
part B pins: 27, 28, 29, 30, 31, 32, 33, 34, 35, 36, 37, 38, 39, 40, 41, 42, 43, 44, 45, 46, 47, 48, 49, 50, 51 MP1, 52 MP2

## GCM0335C1H180FA16D
designator C?, comment 18pF
CAP CER 18PF 50V C0G/NP0 0201; Manufacturer: Murata; Manufacturer Part Number: GCM0335C1H180FA16D; Supplier 1: Digi-Key; RoHS: Yes; Category: Ceramic Capacitors; Stock 1: 7977; Pricing 1: 1=0.10000, 10=0.06500, 50=0.03560, 100=0.02910, 500=0.02076, 1000=0.01630, 2500=0.01482, 5000=0.01364 (USD); RoHS Compliant: Yes; Supplier Part Number 1: 490-GCM0335C1H180FA16DCT-ND
footprint CAP 0201
pins: 1, 2

## GCM1555C1H101JA16D
designator C?, comment 100pF
CAP CER 100PF 50V C0G/NP0 0402; Manufacturer: Murata; Manufacturer Part Number: GCM1555C1H101JA16D; Tolerance: 5%; Dielectric: C0G; Supplier 1: Digi-Key; Stock 1: 2688959; Pricing 1: 1=0.1, 10=0.068, 100=0.0303, 500=0.02166, 1000=0.01701, 2500=0.01547, 5000=0.01423 (USD); Mount: Surface Mount; Case/Package: 0402; Weight: 0.000212oz; Case Code (Metric): 1005; Case Code (Imperial): 0402; Min Operating Temperature: -55°C; Max Operating Temperature: 125°C; Capacitance: 100pF; Packaging: Tape and Reel; Voltage Rating: 50V; Voltage: 50V; Termination: SMD/SMT; Voltage Rating (DC): 50V; Package Quantity: 10000; Length: 1mm; Height: 0.5mm; Width: 0.02inch; Thickness: 0.022inch; Depth: 0.5mm; Ratings: AEC-Q200; Radiation Hardening: No; REACH SVHC: No SVHC; Lead Free: Lead Free; ComponentLink1URL: https://www.verical.com/server-webapp/html/getDatasheet?partID=748988&src-supplier=Verical; ComponentLink1Description: https://www.verical.com/server-webapp/html/getDatasheet?partID=748988&src-supplier=Verical; Supplier Part Number 1: 490-10669-1-ND
footprint Cap0402
pins: 1, 2

## GL850G
designator U?
USB 2.0 Hub Controller; Manufacturer: Genesys; Manufacturer Part No: GL850G-HHY22; Package: SSOP-28; ComponentLink1Description: LCSC; ComponentLink1URL: https://lcsc.com/product-detail/USB-ICs_Genesys-Logic-GL850G-HHY22_C136617.html
footprint SSOP-28
pins: 1 AVDD (power), 2 DM2 (power), 3 DP2 (power), 4 RREF (power), 5 AVDD (power), 6 X1 (power), 7 X2 (power), 8 DM3 (power), 9 DP3 (power), 10 AVDD (power), 11 DM4 (power), 12 DP4 (power), 13 RESET# (power), 14 TEST/SCL (power), 15 GND (power), 16 DVDD (power), 17 PSELF (power), 18 PGANG (power), 19 OVCUR2# (power), 20 PWREN2# (power), 21 OVCUR1# (power), 22 PWREN1# (power), 23 V5 (power), 24 V33 (power), 25 DM0 (power), 26 DP0 (power), 27 DM1 (power), 28 DP1 (power)

## GRM21BR60J107ME15L
designator C?, comment 100uf
CAP CER 100UF 6.3V X5R 0805; Manufacturer: Murata; Manufacturer Part Number: GRM21BR60J107ME15L; Tolerance: 20%; Supplier 1: Digi-Key; Stock 1: 5333; Pricing 1: 1=2.37, 10=1.871, 100=1.4031, 500=1.0601, 1000=0.93538 (USD); Mount: Surface Mount; Case/Package: 0805; Case Code (Metric): 2012; Case Code (Imperial): 0805; Min Operating Temperature: -55°C; Max Operating Temperature: 85°C; Packaging: Cut Tape; Voltage Rating: 6.3V; Dielectric: X5R; Voltage Rating (DC): 6.3V; Capacitance: 100uF; Length: 0.079inch; Width: 0.049inch; Thickness: 0.057inch; REACH SVHC: No SVHC; Lead Free: Lead Free; Supplier Part Number 1: 490-13981-1-ND
footprint Cap0805 (SMD 0805)
pins: 1, 2